# Altium footprint library ubloxLib.PcbLib: 65 footprints (part 3 of 5)
Each footprint in its own frame and in the unit in brackets; x right, y up, seen from the top. Pads: shape width x height; smd on the part's side, far side on the other; paste and mask are expansions set on the pad; w line width, h text height; cw(c..) or ccw(c..) is an arc to the next point about the centre after c.
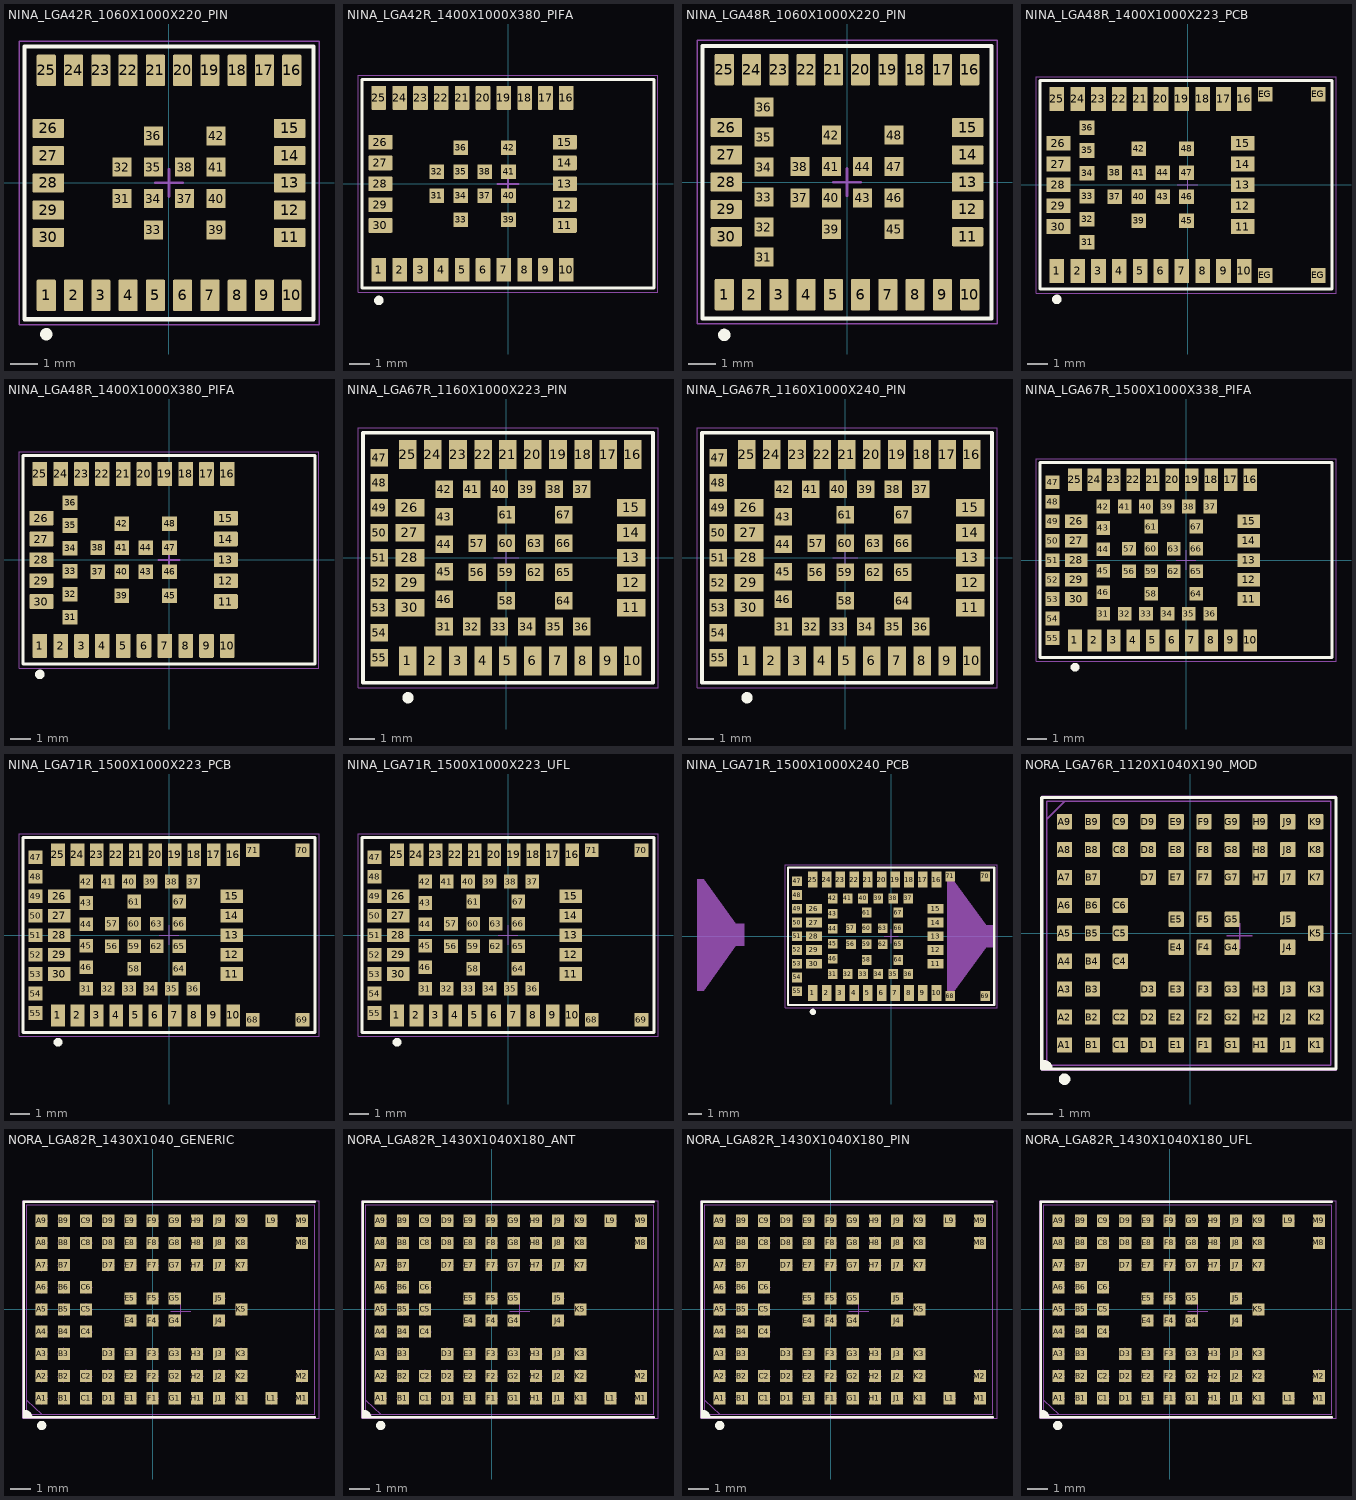
[diagram p2: the footprints below, top view; thin cyan lines are the x and y axes]

## NINA_LGA42R_1060X1000X220_PIN [mm] "Stand-alone Bluetooth low energy module"
height 2.2
pads (42):
  rrect10% 0.7x1.15 smd paste+0 mask+0.05: 1(-4.5,-4.125) 2(-3.5,-4.125) 3(-2.5,-4.125) 4(-1.5,-4.125) 5(-0.5,-4.125) 6(0.5,-4.125) 7(1.5,-4.125) 8(2.5,-4.125) 9(3.5,-4.125) 10(4.5,-4.125) 16(4.5,4.125) 17(3.5,4.125) 18(2.5,4.125) 19(1.5,4.125) 20(0.5,4.125) 21(-0.5,4.125) 22(-1.5,4.125) 23(-2.5,4.125) 24(-3.5,4.125) 25(-4.5,4.125)
  rrect10% 1.15x0.7 smd paste+0 mask+0.05: 11(4.425,-2) 12(4.425,-1) 13(4.425,0) 14(4.425,1) 15(4.425,2) 26(-4.425,2) 27(-4.425,1) 28(-4.425,0) 29(-4.425,-1) 30(-4.425,-2)
  rect 0.7x0.7 smd paste+0 mask+0.05: 31(-1.725,-0.575) 32(-1.725,0.575) 33(-0.575,-1.725) 34(-0.575,-0.575) 35(-0.575,0.575) 36(-0.575,1.725) 37(0.575,-0.575) 38(0.575,0.575) 39(1.725,-1.725) 40(1.725,-0.575) 41(1.725,0.575) 42(1.725,1.725)
Top Overlay:
  circle w0.254: c-4.5,-5.55 r0.1
  lines w0.15: -5.3,-5 5.3,-5 5.3,5 -5.3,5 -5.3,-5
Mechanical 13:
  lines w0.1: -5.3,-5 5.302,-5 5.302,5 -5.3,5 -5.3,-5
Mechanical 15:
  lines w0.05: -5.5,-5.2 -5.5,5.2 5.5,5.2 5.5,-5.2 -5.5,-5.2
  lines w0.1: -0.5,0 0,0 0.5,0 ; 0,-0.5 0,0.5
  text ".Designator" at 0.1,0.433 h1
3D body "NINA-B111.STEP": height 2.26, standoff 0.03, extent -5.3,-5 5.3,5

## NINA_LGA42R_1400X1000X380_PIFA [mm] "Stand-alone Bluetooth low energy module"
height 3.8
pads (42):
  rrect10% 0.7x1.15 smd paste+0 mask+0.05: 1(-6.2,-4.125) 2(-5.2,-4.125) 3(-4.2,-4.125) 4(-3.2,-4.125) 5(-2.2,-4.125) 6(-1.2,-4.125) 7(-0.2,-4.125) 8(0.8,-4.125) 9(1.8,-4.125) 10(2.8,-4.125) 16(2.8,4.125) 17(1.8,4.125) 18(0.8,4.125) 19(-0.2,4.125) 20(-1.2,4.125) 21(-2.2,4.125) 22(-3.2,4.125) 23(-4.2,4.125) 24(-5.2,4.125) 25(-6.2,4.125)
  rrect10% 1.15x0.7 smd paste+0 mask+0.05: 11(2.725,-2) 12(2.725,-1) 13(2.725,0) 14(2.725,1) 15(2.725,2) 26(-6.125,2) 27(-6.125,1) 28(-6.125,0) 29(-6.125,-1) 30(-6.125,-2)
  rect 0.7x0.7 smd paste+0 mask+0.05: 31(-3.425,-0.575) 32(-3.425,0.575) 33(-2.275,-1.725) 34(-2.275,-0.575) 35(-2.275,0.575) 36(-2.275,1.725) 37(-1.125,-0.575) 38(-1.125,0.575) 39(0.025,-1.725) 40(0.025,-0.575) 41(0.025,0.575) 42(0.025,1.725)
Top Overlay:
  circle w0.254: c-6.2,-5.6 r0.1
  lines w0.15: -7,-5 7,-5 7,5 -7,5 -7,-5
Mechanical 13:
  lines w0.1: -7,-5 7,-5 7,5 -7,5 -7,-5
Mechanical 15:
  lines w0.05: -7.2,-5.2 7.2,-5.2 7.2,5.2 -7.2,5.2 -7.2,-5.2
  lines w0.1: -0.5,0 0,0 ; 0,-0.5 0,0.5 ; 0,0 0.5,0 0,0
  text ".Designator" at 0.1,0.433 h1
3D body "NINA-B112.stp": height 3.81, standoff 0.03, extent -7,-5 7,5

## NINA_LGA48R_1060X1000X220_PIN [mm] "Stand-alone Bluetooth low energy module"
height 2.2
pads (48):
  rrect10% 0.7x1.15 smd paste+0 mask+0.05: 1(-4.5,-4.125) 2(-3.5,-4.125) 3(-2.5,-4.125) 4(-1.5,-4.125) 5(-0.5,-4.125) 6(0.5,-4.125) 7(1.5,-4.125) 8(2.5,-4.125) 9(3.5,-4.125) 10(4.5,-4.125) 16(4.5,4.125) 17(3.5,4.125) 18(2.5,4.125) 19(1.5,4.125) 20(0.5,4.125) 21(-0.5,4.125) 22(-1.5,4.125) 23(-2.5,4.125) 24(-3.5,4.125) 25(-4.5,4.125)
  rrect10% 1.15x0.7 smd paste+0 mask+0.05: 11(4.425,-2) 12(4.425,-1) 13(4.425,0) 14(4.425,1) 15(4.425,2) 26(-4.425,2) 27(-4.425,1) 28(-4.425,0) 29(-4.425,-1) 30(-4.425,-2)
  rect 0.7x0.7 smd paste+0 mask+0.05: 31(-3.05,-2.75) 32(-3.05,-1.65) 33(-3.05,-0.55) 34(-3.05,0.55) 35(-3.05,1.65) 36(-3.05,2.75) 37(-1.725,-0.575) 38(-1.725,0.575) 39(-0.575,-1.725) 40(-0.575,-0.575) 41(-0.575,0.575) 42(-0.575,1.725) 43(0.575,-0.575) 44(0.575,0.575) 45(1.725,-1.725) 46(1.725,-0.575) 47(1.725,0.575) 48(1.725,1.725)
Top Overlay:
  circle w0.254: c-4.5,-5.6 r0.1
  lines w0.15: -5.3,-5 -5.3,5 5.3,5 5.3,-5 -5.3,-5
Mechanical 13:
  lines w0.1: -5.3,-5 -5.3,5 5.302,5 5.302,-5 -5.3,-5
Mechanical 15:
  lines w0.05: -5.5,-5.2 5.5,-5.2 5.5,5.2 -5.5,5.2 -5.5,-5.2
  lines w0.1: -0.5,0 0,0 0.5,0 ; 0,-0.5 0,0.5
  text ".Designator" at 0.1,0.433 h1
3D body "NINA-W131-00B.STEP": height 2.25, standoff 0.04, extent -5.3,-5 5.3,5

## NINA_LGA48R_1400X1000X223_PCB [mm] "Stand-alone Bluetooth low energy module"
height 2.23
pads (52):
  rect 0.7x1.15 smd paste+0 mask+0.05: 1(-6.275,-4.125) 2(-5.275,-4.125) 3(-4.275,-4.125) 4(-3.275,-4.125) 5(-2.275,-4.125) 6(-1.275,-4.125) 7(-0.275,-4.125) 8(0.725,-4.125) 9(1.725,-4.125) 10(2.725,-4.125) 16(2.725,4.125) 17(1.725,4.125) 18(0.725,4.125) 19(-0.275,4.125) 20(-1.275,4.125) 21(-2.275,4.125) 22(-3.275,4.125) 23(-4.275,4.125) 24(-5.275,4.125) 25(-6.275,4.125)
  rect 1.15x0.7 smd paste+0 mask+0.05: 11(2.65,-2) 12(2.65,-1) 13(2.65,0) 14(2.65,1) 15(2.65,2) 26(-6.2,2) 27(-6.2,1) 28(-6.2,0) 29(-6.2,-1) 30(-6.2,-2)
  rect 0.7x0.7 smd paste+0 mask+0.05: 31(-4.825,-2.75) 32(-4.825,-1.65) 33(-4.825,-0.55) 34(-4.825,0.55) 35(-4.825,1.65) 36(-4.825,2.75) 37(-3.5,-0.575) 38(-3.5,0.575) 39(-2.35,-1.725) 40(-2.35,-0.575) 41(-2.35,0.575) 42(-2.35,1.725) 43(-1.2,-0.575) 44(-1.2,0.575) 45(-0.05,-1.725) 46(-0.05,-0.575) 47(-0.05,0.575) 48(-0.05,1.725) EG(3.725,-4.35) EG(3.725,4.35) EG(6.275,-4.35) EG(6.275,4.35)
Top Overlay:
  circle w0.254: c-6.275,-5.5 r0.1
  lines w0.15: -7.075,-5 -7.075,5 6.925,5 6.925,-5 -7.075,-5
Mechanical 13:
  lines w0.1: -7.075,-5 -7.075,5 6.925,5 6.925,-5 -7.075,-5
Mechanical 15:
  lines w0.05: -0.5,0 0.5,0 ; 0,-0.5 0,0.5 ; -7.275,-5.2 -7.275,5.2 7.125,5.2 7.125,-5.2 -7.275,-5.2
  text ".Designator" at 0.1,0.433 h1
Multi-Layer:
  pour cut-out: 3.825,4 6.925,4 6.925,-4 3.825,-4
3D body "NINA-W1x6.STEP": height 2.25, standoff -0.01, extent -7.075,-5 6.925,5

## NINA_LGA48R_1400X1000X380_PIFA [mm] "Stand-alone Bluetooth low energy module"
height 3.8
pads (48):
  rrect10% 0.7x1.15 smd paste+0 mask+0.05: 1(-6.2,-4.125) 2(-5.2,-4.125) 3(-4.2,-4.125) 4(-3.2,-4.125) 5(-2.2,-4.125) 6(-1.2,-4.125) 7(-0.2,-4.125) 8(0.8,-4.125) 9(1.8,-4.125) 10(2.8,-4.125) 16(2.8,4.125) 17(1.8,4.125) 18(0.8,4.125) 19(-0.2,4.125) 20(-1.2,4.125) 21(-2.2,4.125) 22(-3.2,4.125) 23(-4.2,4.125) 24(-5.2,4.125) 25(-6.2,4.125)
  rrect10% 1.15x0.7 smd paste+0 mask+0.05: 11(2.725,-2) 12(2.725,-1) 13(2.725,0) 14(2.725,1) 15(2.725,2) 26(-6.125,2) 27(-6.125,1) 28(-6.125,0) 29(-6.125,-1) 30(-6.125,-2)
  rect 0.7x0.7 smd paste+0 mask+0.05: 31(-4.75,-2.75) 32(-4.75,-1.65) 33(-4.75,-0.55) 34(-4.75,0.55) 35(-4.75,1.65) 36(-4.75,2.75) 37(-3.425,-0.575) 38(-3.425,0.575) 39(-2.275,-1.725) 40(-2.275,-0.575) 41(-2.275,0.575) 42(-2.275,1.725) 43(-1.125,-0.575) 44(-1.125,0.575) 45(0.025,-1.725) 46(0.025,-0.575) 47(0.025,0.575) 48(0.025,1.725)
Top Overlay:
  circle w0.254: c-6.2,-5.5 r0.1
  lines w0.15: -7,-5 -7,5 7,5 7,-5 -7,-5
Mechanical 13:
  lines w0.1: -7,-5 -7,5 7,5 7,-5 -7,-5
Mechanical 15:
  lines w0.05: -7.2,-5.2 -7.2,5.2 7.2,5.2 7.2,-5.2 -7.2,-5.2
  lines w0.1: -0.5,0 0,0 0.5,0 ; 0,-0.5 0,0.5
  text ".Designator" at 0.1,0.433 h1
3D body "NINA-W132-00B.STEP": height 3.86, standoff 0.04, extent -7,-5 7,5

## NINA_LGA67R_1160X1000X223_PIN [mm] "Stand-alone Bluetooth low energy module"
height 2.23
pads (67):
  rect 0.7x1.15 smd paste+0 mask+0.05: 1(-3.925,-4.125) 2(-2.925,-4.125) 3(-1.925,-4.125) 4(-0.925,-4.125) 5(0.075,-4.125) 6(1.075,-4.125) 7(2.075,-4.125) 8(3.075,-4.125) 9(4.075,-4.125) 10(5.075,-4.125) 16(5.075,4.125) 17(4.075,4.125) 18(3.075,4.125) 19(2.075,4.125) 20(1.075,4.125) 21(0.075,4.125) 22(-0.925,4.125) 23(-1.925,4.125) 24(-2.925,4.125) 25(-3.925,4.125)
  rect 1.15x0.7 smd paste+0 mask+0.05: 11(5,-2) 12(5,-1) 13(5,0) 14(5,1) 15(5,2) 26(-3.85,2) 27(-3.85,1) 28(-3.85,0) 29(-3.85,-1) 30(-3.85,-2)
  rect 0.7x0.7 smd paste+0 mask+0.05: 31(-2.475,-2.75) 32(-1.375,-2.75) 33(-0.275,-2.75) 34(0.825,-2.75) 35(1.925,-2.75) 36(3.025,-2.75) 37(3.025,2.75) 38(1.925,2.75) 39(0.825,2.75) 40(-0.275,2.75) 41(-1.375,2.75) 42(-2.475,2.75) 43(-2.475,1.65) 44(-2.475,0.55) 45(-2.475,-0.55) 46(-2.475,-1.65) 47(-5.075,4) 48(-5.075,3) 49(-5.075,2) 50(-5.075,1) 51(-5.075,0) 52(-5.075,-1) 53(-5.075,-2) 54(-5.075,-3) 55(-5.075,-4) 56(-1.15,-0.575) 57(-1.15,0.575) 58(0,-1.725) 59(0,-0.575) 60(0,0.575) 61(0,1.725) 62(1.15,-0.575) 63(1.15,0.575) 64(2.3,-1.725) 65(2.3,-0.575) 66(2.3,0.575) 67(2.3,1.725)
Top Overlay:
  circle w0.254: c-3.925,-5.6 r0.1
  lines w0.15: -5.725,-5 5.875,-5 5.875,5 -5.725,5 -5.725,-5
Mechanical 13:
  lines w0.1: -5.725,-5 -5.725,5 5.875,5 5.875,-5 -5.725,-5
Mechanical 15:
  lines w0.05: -0.5,0 0.5,0 ; 0,-0.5 0,0.5 ; -5.925,-5.2 -5.925,5.2 6.075,5.2 6.075,-5.2 -5.925,-5.2
  text ".Designator" at 0.1,0.433 h1
3D body "NINA-B311_mechanical_model.stp": height 2.36, standoff 0.03, extent -5.725,-5 5.875,5

## NINA_LGA67R_1160X1000X240_PIN [mm] "Stand-alone Bluetooth low energy module"
height 2.4
pads (67):
  rect 0.7x1.15 smd paste+0 mask+0.05: 1(-3.925,-4.125) 2(-2.925,-4.125) 3(-1.925,-4.125) 4(-0.925,-4.125) 5(0.075,-4.125) 6(1.075,-4.125) 7(2.075,-4.125) 8(3.075,-4.125) 9(4.075,-4.125) 10(5.075,-4.125) 16(5.075,4.125) 17(4.075,4.125) 18(3.075,4.125) 19(2.075,4.125) 20(1.075,4.125) 21(0.075,4.125) 22(-0.925,4.125) 23(-1.925,4.125) 24(-2.925,4.125) 25(-3.925,4.125)
  rect 1.15x0.7 smd paste+0 mask+0.05: 11(5,-2) 12(5,-1) 13(5,0) 14(5,1) 15(5,2) 26(-3.85,2) 27(-3.85,1) 28(-3.85,0) 29(-3.85,-1) 30(-3.85,-2)
  rect 0.7x0.7 smd paste+0 mask+0.05: 31(-2.475,-2.75) 32(-1.375,-2.75) 33(-0.275,-2.75) 34(0.825,-2.75) 35(1.925,-2.75) 36(3.025,-2.75) 37(3.025,2.75) 38(1.925,2.75) 39(0.825,2.75) 40(-0.275,2.75) 41(-1.375,2.75) 42(-2.475,2.75) 43(-2.475,1.65) 44(-2.475,0.55) 45(-2.475,-0.55) 46(-2.475,-1.65) 47(-5.075,4) 48(-5.075,3) 49(-5.075,2) 50(-5.075,1) 51(-5.075,0) 52(-5.075,-1) 53(-5.075,-2) 54(-5.075,-3) 55(-5.075,-4) 56(-1.15,-0.575) 57(-1.15,0.575) 58(0,-1.725) 59(0,-0.575) 60(0,0.575) 61(0,1.725) 62(1.15,-0.575) 63(1.15,0.575) 64(2.3,-1.725) 65(2.3,-0.575) 66(2.3,0.575) 67(2.3,1.725)
Top Overlay:
  circle w0.254: c-3.925,-5.6 r0.1
  lines w0.15: -5.725,-5 5.875,-5 5.875,5 -5.725,5 -5.725,-5
Mechanical 13:
  lines w0.1: -5.725,-5 -5.725,5 5.875,5 5.875,-5 -5.725,-5
Mechanical 15:
  lines w0.05: -0.5,0 0.5,0 ; 0,-0.5 0,0.5 ; -5.925,-5.2 -5.925,5.2 6.075,5.2 6.075,-5.2 -5.925,-5.2
  text ".Designator" at 0.1,0.433 h1
3D body "NINA-B501.step": height 2.53, standoff 0.07, extent -5.725,-5 5.875,5

## NINA_LGA67R_1500X1000X338_PIFA [mm] "Stand-alone Bluetooth low energy module"
height 3.38
pads (67):
  rect 0.7x1.15 smd paste+0 mask+0.05: 1(-5.7,-4.125) 2(-4.7,-4.125) 3(-3.7,-4.125) 4(-2.7,-4.125) 5(-1.7,-4.125) 6(-0.7,-4.125) 7(0.3,-4.125) 8(1.3,-4.125) 9(2.3,-4.125) 10(3.3,-4.125) 16(3.3,4.125) 17(2.3,4.125) 18(1.3,4.125) 19(0.3,4.125) 20(-0.7,4.125) 21(-1.7,4.125) 22(-2.7,4.125) 23(-3.7,4.125) 24(-4.7,4.125) 25(-5.7,4.125)
  rect 1.15x0.7 smd paste+0 mask+0.05: 11(3.225,-2) 12(3.225,-1) 13(3.225,0) 14(3.225,1) 15(3.225,2) 26(-5.625,2) 27(-5.625,1) 28(-5.625,0) 29(-5.625,-1) 30(-5.625,-2)
  rect 0.7x0.7 smd paste+0 mask+0.05: 31(-4.25,-2.75) 32(-3.15,-2.75) 33(-2.05,-2.75) 34(-0.95,-2.75) 35(0.15,-2.75) 36(1.25,-2.75) 37(1.25,2.75) 38(0.15,2.75) 39(-0.95,2.75) 40(-2.05,2.75) 41(-3.15,2.75) 42(-4.25,2.75) 43(-4.25,1.65) 44(-4.25,0.55) 45(-4.25,-0.55) 46(-4.25,-1.65) 47(-6.85,4) 48(-6.85,3) 49(-6.85,2) 50(-6.85,1) 51(-6.85,0) 52(-6.85,-1) 53(-6.85,-2) 54(-6.85,-3) 55(-6.85,-4) 56(-2.925,-0.575) 57(-2.925,0.575) 58(-1.775,-1.725) 59(-1.775,-0.575) 60(-1.775,0.575) 61(-1.775,1.725) 62(-0.625,-0.575) 63(-0.625,0.575) 64(0.525,-1.725) 65(0.525,-0.575) 66(0.525,0.575) 67(0.525,1.725)
Top Overlay:
  circle w0.254: c-5.7,-5.5 r0.1
  lines w0.15: -7.5,-5 7.5,-5 7.5,5 -7.5,5 -7.5,-5
Mechanical 13:
  lines w0.1: -7.5,-5 7.5,-5 7.5,5 -7.5,5 -7.5,-5
Mechanical 15:
  lines w0.05: -0.5,0 0.5,0 ; 0,-0.5 0,0.5 ; -7.7,-5.2 7.7,-5.2 7.7,5.2 -7.7,5.2 -7.7,-5.2
  text ".Designator" at 0.1,0.433 h1
3D body "NINA-B312_mechanical_model.stp": height 3.91, standoff 0.03, extent -7.5,-5 7.5,5

## NINA_LGA71R_1500X1000X223_PCB [mm] "Stand-alone Bluetooth low energy module"
height 3.38
pads (71):
  rect 0.7x1.15 smd paste+0 mask+0.05: 1(-5.7,-4.125) 2(-4.7,-4.125) 3(-3.7,-4.125) 4(-2.7,-4.125) 5(-1.7,-4.125) 6(-0.7,-4.125) 7(0.3,-4.125) 8(1.3,-4.125) 9(2.3,-4.125) 10(3.3,-4.125) 16(3.3,4.125) 17(2.3,4.125) 18(1.3,4.125) 19(0.3,4.125) 20(-0.7,4.125) 21(-1.7,4.125) 22(-2.7,4.125) 23(-3.7,4.125) 24(-4.7,4.125) 25(-5.7,4.125)
  rect 1.15x0.7 smd paste+0 mask+0.05: 11(3.225,-2) 12(3.225,-1) 13(3.225,0) 14(3.225,1) 15(3.225,2) 26(-5.625,2) 27(-5.625,1) 28(-5.625,0) 29(-5.625,-1) 30(-5.625,-2)
  rect 0.7x0.7 smd paste+0 mask+0.05: 31(-4.25,-2.75) 32(-3.15,-2.75) 33(-2.05,-2.75) 34(-0.95,-2.75) 35(0.15,-2.75) 36(1.25,-2.75) 37(1.25,2.75) 38(0.15,2.75) 39(-0.95,2.75) 40(-2.05,2.75) 41(-3.15,2.75) 42(-4.25,2.75) 43(-4.25,1.65) 44(-4.25,0.55) 45(-4.25,-0.55) 46(-4.25,-1.65) 47(-6.85,4) 48(-6.85,3) 49(-6.85,2) 50(-6.85,1) 51(-6.85,0) 52(-6.85,-1) 53(-6.85,-2) 54(-6.85,-3) 55(-6.85,-4) 56(-2.925,-0.575) 57(-2.925,0.575) 58(-1.775,-1.725) 59(-1.775,-0.575) 60(-1.775,0.575) 61(-1.775,1.725) 62(-0.625,-0.575) 63(-0.625,0.575) 64(0.525,-1.725) 65(0.525,-0.575) 66(0.525,0.575) 67(0.525,1.725) 68(4.3,-4.35) 69(6.85,-4.35) 70(6.85,4.35) 71(4.3,4.35)
Top Overlay:
  circle w0.254: c-5.7,-5.5 r0.1
  lines w0.15: -7.5,-5 7.5,-5 7.5,5 -7.5,5 -7.5,-5
Mechanical 13:
  lines w0.1: -7.5,-5 7.5,-5 7.5,5 -7.5,5 -7.5,-5
Mechanical 15:
  lines w0.05: -0.5,0 0.5,0 ; 0,-0.5 0,0.5 ; -7.7,-5.2 7.7,-5.2 7.7,5.2 -7.7,5.2 -7.7,-5.2
  text ".Designator" at 0.1,0.433 h1
Multi-Layer:
  pour cut-out: 4.4,4 7.5,4 7.5,-4 4.4,-4
3D body "NINA-B3x6_mechanical_model.stp": height 2.31, standoff 0.03, extent -7.5,-5 7.5,5

## NINA_LGA71R_1500X1000X223_UFL [mm] "Stand-alone Bluetooth low energy module"
height 2.23
pads (71):
  rect 0.7x1.15 smd paste+0 mask+0.05: 1(-5.7,-4.125) 2(-4.7,-4.125) 3(-3.7,-4.125) 4(-2.7,-4.125) 5(-1.7,-4.125) 6(-0.7,-4.125) 7(0.3,-4.125) 8(1.3,-4.125) 9(2.3,-4.125) 10(3.3,-4.125) 16(3.3,4.125) 17(2.3,4.125) 18(1.3,4.125) 19(0.3,4.125) 20(-0.7,4.125) 21(-1.7,4.125) 22(-2.7,4.125) 23(-3.7,4.125) 24(-4.7,4.125) 25(-5.7,4.125)
  rect 1.15x0.7 smd paste+0 mask+0.05: 11(3.225,-2) 12(3.225,-1) 13(3.225,0) 14(3.225,1) 15(3.225,2) 26(-5.625,2) 27(-5.625,1) 28(-5.625,0) 29(-5.625,-1) 30(-5.625,-2)
  rect 0.7x0.7 smd paste+0 mask+0.05: 31(-4.25,-2.75) 32(-3.15,-2.75) 33(-2.05,-2.75) 34(-0.95,-2.75) 35(0.15,-2.75) 36(1.25,-2.75) 37(1.25,2.75) 38(0.15,2.75) 39(-0.95,2.75) 40(-2.05,2.75) 41(-3.15,2.75) 42(-4.25,2.75) 43(-4.25,1.65) 44(-4.25,0.55) 45(-4.25,-0.55) 46(-4.25,-1.65) 47(-6.85,4) 48(-6.85,3) 49(-6.85,2) 50(-6.85,1) 51(-6.85,0) 52(-6.85,-1) 53(-6.85,-2) 54(-6.85,-3) 55(-6.85,-4) 56(-2.925,-0.575) 57(-2.925,0.575) 58(-1.775,-1.725) 59(-1.775,-0.575) 60(-1.775,0.575) 61(-1.775,1.725) 62(-0.625,-0.575) 63(-0.625,0.575) 64(0.525,-1.725) 65(0.525,-0.575) 66(0.525,0.575) 67(0.525,1.725) 68(4.3,-4.35) 69(6.85,-4.35) 70(6.85,4.35) 71(4.3,4.35)
Top Overlay:
  circle w0.254: c-5.7,-5.5 r0.1
  lines w0.15: -7.5,-5 7.5,-5 7.5,5 -7.5,5 -7.5,-5
Mechanical 13:
  lines w0.1: -7.5,-5 7.5,-5 7.5,5 -7.5,5 -7.5,-5
Mechanical 15:
  lines w0.05: -0.5,0 0.5,0 ; 0,-0.5 0,0.5 ; -7.7,-5.2 7.7,-5.2 7.7,5.2 -7.7,5.2 -7.7,-5.2
  text ".Designator" at 0.1,0.433 h1
3D body "NINA-B400.stp": height 2.31, standoff 0.03, extent -7.5,-5 7.5,5

## NINA_LGA71R_1500X1000X240_PCB [mm] "Stand-alone Bluetooth low energy module"
height 2.4
pads (71):
  rect 0.7x1.15 smd paste+0 mask+0.05: 1(-5.7,-4.125) 2(-4.7,-4.125) 3(-3.7,-4.125) 4(-2.7,-4.125) 5(-1.7,-4.125) 6(-0.7,-4.125) 7(0.3,-4.125) 8(1.3,-4.125) 9(2.3,-4.125) 10(3.3,-4.125) 16(3.3,4.125) 17(2.3,4.125) 18(1.3,4.125) 19(0.3,4.125) 20(-0.7,4.125) 21(-1.7,4.125) 22(-2.7,4.125) 23(-3.7,4.125) 24(-4.7,4.125) 25(-5.7,4.125)
  rect 1.15x0.7 smd paste+0 mask+0.05: 11(3.225,-2) 12(3.225,-1) 13(3.225,0) 14(3.225,1) 15(3.225,2) 26(-5.625,2) 27(-5.625,1) 28(-5.625,0) 29(-5.625,-1) 30(-5.625,-2)
  rect 0.7x0.7 smd paste+0 mask+0.05: 31(-4.25,-2.75) 32(-3.15,-2.75) 33(-2.05,-2.75) 34(-0.95,-2.75) 35(0.15,-2.75) 36(1.25,-2.75) 37(1.25,2.75) 38(0.15,2.75) 39(-0.95,2.75) 40(-2.05,2.75) 41(-3.15,2.75) 42(-4.25,2.75) 43(-4.25,1.65) 44(-4.25,0.55) 45(-4.25,-0.55) 46(-4.25,-1.65) 47(-6.85,4) 48(-6.85,3) 49(-6.85,2) 50(-6.85,1) 51(-6.85,0) 52(-6.85,-1) 53(-6.85,-2) 54(-6.85,-3) 55(-6.85,-4) 56(-2.925,-0.575) 57(-2.925,0.575) 58(-1.775,-1.725) 59(-1.775,-0.575) 60(-1.775,0.575) 61(-1.775,1.725) 62(-0.625,-0.575) 63(-0.625,0.575) 64(0.525,-1.725) 65(0.525,-0.575) 66(0.525,0.575) 67(0.525,1.725) 68(4.3,-4.35) 69(6.85,-4.35) 70(6.85,4.35) 71(4.3,4.35)
Top Overlay:
  circle w0.254: c-5.7,-5.5 r0.1
  lines w0.15: -7.5,-5 -7.5,5 7.5,5 7.5,-5 -7.5,-5
Mechanical 13:
  cavity: 7.5,0.8 6.9,0.8 4.55,4.05 4.07,4.05 4.07,-4.05 4.55,-4.05 6.9,-0.8 7.5,-0.8
  lines w0.1: -7.5,-5 -7.5,5 7.5,5 7.5,-5 -7.5,-5
Mechanical 14:
  cavity: -10.7,0.9 -11.3,0.9 -13.65,4.15 -14.13,4.15 -14.13,-3.95 -13.65,-3.95 -11.3,-0.7 -10.7,-0.7
Mechanical 15:
  lines w0.05: -0.5,0 0.5,0 ; 0,-0.5 0,0.5 ; -7.7,-5.2 -7.7,5.2 7.7,5.2 7.7,-5.2 -7.7,-5.2
  text ".Designator" at 0.1,0.433 h1
3D body "NINA-B506.step": height 2.46, standoff 0, extent -7.5,-5 7.5,5

## NORA_LGA76R_1120X1040X190_MOD [mm] "NORA LGA.76pin ,1.1mm Pitch, 11.2mm x 10.4mm, to be used for modules"
height 1.9
pads (76):
  rrect10% 0.6x0.6 smd: A1(-4.95,-4.4) A2(-4.95,-3.3) A3(-4.95,-2.2) A4(-4.95,-1.1) A5(-4.95,0) A6(-4.95,1.1) A7(-4.95,2.2) A8(-4.95,3.3) A9(-4.95,4.4) B1(-3.85,-4.4) B2(-3.85,-3.3) B3(-3.85,-2.2) B4(-3.85,-1.1) B5(-3.85,0) B6(-3.85,1.1) B7(-3.85,2.2) B8(-3.85,3.3) B9(-3.85,4.4) C1(-2.75,-4.4) C2(-2.75,-3.3) C4(-2.75,-1.1) C5(-2.75,0) C6(-2.75,1.1) C8(-2.75,3.3) C9(-2.75,4.4) D1(-1.65,-4.4) D2(-1.65,-3.3) D3(-1.65,-2.2) D7(-1.65,2.2) D8(-1.65,3.3) D9(-1.65,4.4) E1(-0.55,-4.4) E2(-0.55,-3.3) E3(-0.55,-2.2) E4(-0.55,-0.55) E5(-0.55,0.55) E7(-0.55,2.2) E8(-0.55,3.3) E9(-0.55,4.4) F1(0.55,-4.4) F2(0.55,-3.3) F3(0.55,-2.2) F4(0.55,-0.55) F5(0.55,0.55) F7(0.55,2.2) F8(0.55,3.3) F9(0.55,4.4) G1(1.65,-4.4) G2(1.65,-3.3) G3(1.65,-2.2) G4(1.65,-0.55) G5(1.65,0.55) G7(1.65,2.2) G8(1.65,3.3) G9(1.65,4.4) H1(2.75,-4.4) H2(2.75,-3.3) H3(2.75,-2.2) H7(2.75,2.2) H8(2.75,3.3) H9(2.75,4.4) J1(3.85,-4.4) J2(3.85,-3.3) J3(3.85,-2.2) J4(3.85,-0.55) J5(3.85,0.55) J7(3.85,2.2) J8(3.85,3.3) J9(3.85,4.4) K1(4.95,-4.4) K2(4.95,-3.3) K3(4.95,-2.2) K5(4.95,0) K7(4.95,2.2) K8(4.95,3.3) K9(4.95,4.4)
Top Overlay:
  circle w0.254: c-4.95,-5.75 r0.1
  lines w0.127: -5.85,-5.35 5.75,-5.35 5.75,5.35 -5.85,5.35 -5.85,-5.35
  lines w0.128: -5.793,-5.194 -5.643,-5.344 ; -5.75,-5.15 cw(c-5.75,-5.3) -5.6,-5.3 ; -5.75,-5.05 cw(c-5.775,-5.349) -5.475,-5.349
Mechanical 11:
  text ".Designator" at -0.525,-0.775 h0.5
Mechanical 13:
  lines w0.05: -5.65,4.5 -4.95,5.2 ; -5.65,-5.2 5.55,-5.2 5.55,5.2 -5.65,5.2 -5.65,-5.2
Mechanical 15:
  lines w0.05: 1.45,-0.1 2.45,-0.1 ; 1.95,-0.6 1.95,0.4 ; -5.85,-5.4 5.75,-5.4 5.75,5.4 -5.85,5.4 -5.85,-5.4
3D body "NORA-B201_1120um.step": height 1.95, standoff 0.01, extent -5.65,-5.2 5.55,5.2

## NORA_LGA82R_1430X1040_GENERIC [mm] "NORA LGA, 82pin ,1.1mm Pitch, 14.3mm x 10.4mm"
height 1.8
pads (82):
  rect 0.6x0.6 smd: A1(-5.5,-4.4) A2(-5.5,-3.3) A3(-5.5,-2.2) A4(-5.5,-1.1) A5(-5.5,0) A6(-5.5,1.1) A7(-5.5,2.2) A8(-5.5,3.3) A9(-5.5,4.4) B1(-4.4,-4.4) B2(-4.4,-3.3) B3(-4.4,-2.2) B4(-4.4,-1.1) B5(-4.4,0) B6(-4.4,1.1) B7(-4.4,2.2) B8(-4.4,3.3) B9(-4.4,4.4) C1(-3.3,-4.4) C2(-3.3,-3.3) C4(-3.3,-1.1) C5(-3.3,0) C6(-3.3,1.1) C8(-3.3,3.3) C9(-3.3,4.4) D1(-2.2,-4.4) D2(-2.2,-3.3) D3(-2.2,-2.2) D7(-2.2,2.2) D8(-2.2,3.3) D9(-2.2,4.4) E1(-1.1,-4.4) E2(-1.1,-3.3) E3(-1.1,-2.2) E4(-1.1,-0.55) E5(-1.1,0.55) E7(-1.1,2.2) E8(-1.1,3.3) E9(-1.1,4.4) F1(0,-4.4) F2(0,-3.3) F3(0,-2.2) F4(0,-0.55) F5(0,0.55) F7(0,2.2) F8(0,3.3) F9(0,4.4) G1(1.1,-4.4) G2(1.1,-3.3) G3(1.1,-2.2) G4(1.1,-0.55) G5(1.1,0.55) G7(1.1,2.2) G8(1.1,3.3) G9(1.1,4.4) H1(2.2,-4.4) H2(2.2,-3.3) H3(2.2,-2.2) H7(2.2,2.2) H8(2.2,3.3) H9(2.2,4.4) J1(3.3,-4.4) J2(3.3,-3.3) J3(3.3,-2.2) J4(3.3,-0.55) J5(3.3,0.55) J7(3.3,2.2) J8(3.3,3.3) J9(3.3,4.4) K1(4.4,-4.4) K2(4.4,-3.3) K3(4.4,-2.2) K5(4.4,0) K7(4.4,2.2) K8(4.4,3.3) K9(4.4,4.4) L1(5.9,-4.4) L9(5.9,4.4) M1(7.4,-4.4) M2(7.4,-3.3) M8(7.4,3.3) M9(7.4,4.4)
Top Overlay:
  circle w0.254: c-5.5,-5.75 r0.1
  lines w0.127: 8.05,-5.35 -6.4,-5.35 -6.4,5.35 8.05,5.35
  lines w0.128: -6.343,-5.194 -6.193,-5.344 ; -6.3,-5.15 cw(c-6.3,-5.3) -6.15,-5.3 ; -6.3,-5.05 cw(c-6.325,-5.349) -6.025,-5.349
Mechanical 11:
  text ".Designator" at -1.075,-0.775 h1.5
Mechanical 13:
  lines w0.05: -6.25,-4.5 -5.5,-5.2 ; -6.25,-5.2 8.05,-5.2 8.05,5.2 -6.25,5.2 -6.25,-5.2
Mechanical 14:
  drawing of 328 lines, arcs and shapes, not listed
Mechanical 15:
  lines w0.05: 0.9,-0.1 1.9,-0.1 ; 1.4,-0.6 1.4,0.4 ; -6.45,-5.4 -6.45,5.4 8.25,5.4 8.25,-5.4 -6.45,-5.4
Mechanical 16:
  drawing of 492 lines, arcs and shapes, not listed
Multi-Layer:
  pour cut-out: 7.1,-4.1 7.1,-3.001 7.9,-2.998 7.9,-5.225 8.25,-5.225 8.25,5.325 7.9,5.325 7.9,3 7.1,3 7.1,4.1 4.7,4.1 4.7,-4.1

## NORA_LGA82R_1430X1040X180_ANT [mm] "NORA LGA, 82pin ,1.1mm Pitch, 14.3mm x 10.4mm"
height 1.8
pads (82):
  rect 0.6x0.6 smd: A1(-5.5,-4.4) A2(-5.5,-3.3) A3(-5.5,-2.2) A4(-5.5,-1.1) A5(-5.5,0) A6(-5.5,1.1) A7(-5.5,2.2) A8(-5.5,3.3) A9(-5.5,4.4) B1(-4.4,-4.4) B2(-4.4,-3.3) B3(-4.4,-2.2) B4(-4.4,-1.1) B5(-4.4,0) B6(-4.4,1.1) B7(-4.4,2.2) B8(-4.4,3.3) B9(-4.4,4.4) C1(-3.3,-4.4) C2(-3.3,-3.3) C4(-3.3,-1.1) C5(-3.3,0) C6(-3.3,1.1) C8(-3.3,3.3) C9(-3.3,4.4) D1(-2.2,-4.4) D2(-2.2,-3.3) D3(-2.2,-2.2) D7(-2.2,2.2) D8(-2.2,3.3) D9(-2.2,4.4) E1(-1.1,-4.4) E2(-1.1,-3.3) E3(-1.1,-2.2) E4(-1.1,-0.55) E5(-1.1,0.55) E7(-1.1,2.2) E8(-1.1,3.3) E9(-1.1,4.4) F1(0,-4.4) F2(0,-3.3) F3(0,-2.2) F4(0,-0.55) F5(0,0.55) F7(0,2.2) F8(0,3.3) F9(0,4.4) G1(1.1,-4.4) G2(1.1,-3.3) G3(1.1,-2.2) G4(1.1,-0.55) G5(1.1,0.55) G7(1.1,2.2) G8(1.1,3.3) G9(1.1,4.4) H1(2.2,-4.4) H2(2.2,-3.3) H3(2.2,-2.2) H7(2.2,2.2) H8(2.2,3.3) H9(2.2,4.4) J1(3.3,-4.4) J2(3.3,-3.3) J3(3.3,-2.2) J4(3.3,-0.55) J5(3.3,0.55) J7(3.3,2.2) J8(3.3,3.3) J9(3.3,4.4) K1(4.4,-4.4) K2(4.4,-3.3) K3(4.4,-2.2) K5(4.4,0) K7(4.4,2.2) K8(4.4,3.3) K9(4.4,4.4) L1(5.9,-4.4) L9(5.9,4.4) M1(7.4,-4.4) M2(7.4,-3.3) M8(7.4,3.3) M9(7.4,4.4)
Top Overlay:
  circle w0.254: c-5.5,-5.75 r0.1
  lines w0.127: 8.05,-5.35 -6.4,-5.35 -6.4,5.35 8.05,5.35
  lines w0.128: -6.343,-5.194 -6.193,-5.344 ; -6.3,-5.15 cw(c-6.3,-5.3) -6.15,-5.3 ; -6.3,-5.05 cw(c-6.325,-5.349) -6.025,-5.349
Mechanical 11:
  text ".Designator" at -1.075,-0.775 h1.5
Mechanical 13:
  lines w0.05: -6.25,-4.5 -5.5,-5.2 ; -6.25,-5.2 -6.25,5.2 8.05,5.2 8.05,-5.2 -6.25,-5.2
Mechanical 14:
  drawing of 328 lines, arcs and shapes, not listed
Mechanical 15:
  lines w0.05: 0.9,-0.1 1.9,-0.1 ; 1.4,-0.6 1.4,0.4 ; -6.45,-5.4 8.25,-5.4 8.25,5.4 -6.45,5.4 -6.45,-5.4
Mechanical 16:
  drawing of 492 lines, arcs and shapes, not listed
Multi-Layer:
  pour cut-out: 7.1,-4.1 7.1,-3.001 7.9,-2.998 7.9,-5.225 8.25,-5.225 8.25,5.325 7.9,5.325 7.9,3 7.1,3 7.1,4.1 4.7,4.1 4.7,-4.1
3D body "NORA-B506_v1.step": height 1.78, standoff -0.01, extent -6.25,-5.2 8.05,5.2

## NORA_LGA82R_1430X1040X180_PIN [mm] "NORA LGA, 82pin ,1.1mm Pitch, 14.3mm x 10.4mm"
height 1.8
pads (82):
  rect 0.6x0.6 smd: A1(-5.5,-4.4) A2(-5.5,-3.3) A3(-5.5,-2.2) A4(-5.5,-1.1) A5(-5.5,0) A6(-5.5,1.1) A7(-5.5,2.2) A8(-5.5,3.3) A9(-5.5,4.4) B1(-4.4,-4.4) B2(-4.4,-3.3) B3(-4.4,-2.2) B4(-4.4,-1.1) B5(-4.4,0) B6(-4.4,1.1) B7(-4.4,2.2) B8(-4.4,3.3) B9(-4.4,4.4) C1(-3.3,-4.4) C2(-3.3,-3.3) C4(-3.3,-1.1) C5(-3.3,0) C6(-3.3,1.1) C8(-3.3,3.3) C9(-3.3,4.4) D1(-2.2,-4.4) D2(-2.2,-3.3) D3(-2.2,-2.2) D7(-2.2,2.2) D8(-2.2,3.3) D9(-2.2,4.4) E1(-1.1,-4.4) E2(-1.1,-3.3) E3(-1.1,-2.2) E4(-1.1,-0.55) E5(-1.1,0.55) E7(-1.1,2.2) E8(-1.1,3.3) E9(-1.1,4.4) F1(0,-4.4) F2(0,-3.3) F3(0,-2.2) F4(0,-0.55) F5(0,0.55) F7(0,2.2) F8(0,3.3) F9(0,4.4) G1(1.1,-4.4) G2(1.1,-3.3) G3(1.1,-2.2) G4(1.1,-0.55) G5(1.1,0.55) G7(1.1,2.2) G8(1.1,3.3) G9(1.1,4.4) H1(2.2,-4.4) H2(2.2,-3.3) H3(2.2,-2.2) H7(2.2,2.2) H8(2.2,3.3) H9(2.2,4.4) J1(3.3,-4.4) J2(3.3,-3.3) J3(3.3,-2.2) J4(3.3,-0.55) J5(3.3,0.55) J7(3.3,2.2) J8(3.3,3.3) J9(3.3,4.4) K1(4.4,-4.4) K2(4.4,-3.3) K3(4.4,-2.2) K5(4.4,0) K7(4.4,2.2) K8(4.4,3.3) K9(4.4,4.4) L1(5.9,-4.4) L9(5.9,4.4) M1(7.4,-4.4) M2(7.4,-3.3) M8(7.4,3.3) M9(7.4,4.4)
Top Overlay:
  circle w0.254: c-5.5,-5.75 r0.1
  lines w0.127: 8.05,-5.35 -6.4,-5.35 -6.4,5.35 8.05,5.35
  lines w0.128: -6.343,-5.194 -6.193,-5.344 ; -6.3,-5.15 cw(c-6.3,-5.3) -6.15,-5.3 ; -6.3,-5.05 cw(c-6.325,-5.349) -6.025,-5.349
Mechanical 11:
  text ".Designator" at -1.075,-0.775 h1.5
Mechanical 13:
  lines w0.05: -6.25,-4.5 -5.5,-5.2 ; -6.25,-5.2 8.05,-5.2 8.05,5.2 -6.25,5.2 -6.25,-5.2
Mechanical 14:
  drawing of 328 lines, arcs and shapes, not listed
Mechanical 15:
  lines w0.05: 0.9,-0.1 1.9,-0.1 ; 1.4,-0.6 1.4,0.4 ; -6.45,-5.4 -6.45,5.4 8.25,5.4 8.25,-5.4 -6.45,-5.4
Mechanical 16:
  drawing of 492 lines, arcs and shapes, not listed
Multi-Layer:
  pour cut-out: 7.1,-4.1 7.1,-3.001 7.9,-2.998 7.9,-5.225 8.25,-5.225 8.25,5.325 7.9,5.325 7.9,3 7.1,3 7.1,4.1 4.7,4.1 4.7,-4.1
3D body "NORA-B101_revA.step": height 1.78, standoff -0.01, extent -6.25,-5.2 8.05,5.2

## NORA_LGA82R_1430X1040X180_UFL [mm] "NORA LGA, 82pin ,1.1mm Pitch, 14.3mm x 10.4mm"
height 1.8
pads (82):
  rect 0.6x0.6 smd: A1(-5.5,-4.4) A2(-5.5,-3.3) A3(-5.5,-2.2) A4(-5.5,-1.1) A5(-5.5,0) A6(-5.5,1.1) A7(-5.5,2.2) A8(-5.5,3.3) A9(-5.5,4.4) B1(-4.4,-4.4) B2(-4.4,-3.3) B3(-4.4,-2.2) B4(-4.4,-1.1) B5(-4.4,0) B6(-4.4,1.1) B7(-4.4,2.2) B8(-4.4,3.3) B9(-4.4,4.4) C1(-3.3,-4.4) C2(-3.3,-3.3) C4(-3.3,-1.1) C5(-3.3,0) C6(-3.3,1.1) C8(-3.3,3.3) C9(-3.3,4.4) D1(-2.2,-4.4) D2(-2.2,-3.3) D3(-2.2,-2.2) D7(-2.2,2.2) D8(-2.2,3.3) D9(-2.2,4.4) E1(-1.1,-4.4) E2(-1.1,-3.3) E3(-1.1,-2.2) E4(-1.1,-0.55) E5(-1.1,0.55) E7(-1.1,2.2) E8(-1.1,3.3) E9(-1.1,4.4) F1(0,-4.4) F2(0,-3.3) F3(0,-2.2) F4(0,-0.55) F5(0,0.55) F7(0,2.2) F8(0,3.3) F9(0,4.4) G1(1.1,-4.4) G2(1.1,-3.3) G3(1.1,-2.2) G4(1.1,-0.55) G5(1.1,0.55) G7(1.1,2.2) G8(1.1,3.3) G9(1.1,4.4) H1(2.2,-4.4) H2(2.2,-3.3) H3(2.2,-2.2) H7(2.2,2.2) H8(2.2,3.3) H9(2.2,4.4) J1(3.3,-4.4) J2(3.3,-3.3) J3(3.3,-2.2) J4(3.3,-0.55) J5(3.3,0.55) J7(3.3,2.2) J8(3.3,3.3) J9(3.3,4.4) K1(4.4,-4.4) K2(4.4,-3.3) K3(4.4,-2.2) K5(4.4,0) K7(4.4,2.2) K8(4.4,3.3) K9(4.4,4.4) L1(5.9,-4.4) L9(5.9,4.4) M1(7.4,-4.4) M2(7.4,-3.3) M8(7.4,3.3) M9(7.4,4.4)
Top Overlay:
  circle w0.254: c-5.55,-5.75 r0.1
  lines w0.127: 8.05,-5.35 -6.4,-5.35 -6.4,5.35 8.05,5.35
  lines w0.128: -6.343,-5.194 -6.193,-5.344 ; -6.3,-5.15 cw(c-6.3,-5.3) -6.15,-5.3 ; -6.3,-5.05 cw(c-6.325,-5.349) -6.025,-5.349
Mechanical 11:
  text ".Designator" at -1.075,-0.775 h1.5
Mechanical 13:
  lines w0.05: -6.25,-4.5 -5.5,-5.2 ; -6.25,-5.2 8.05,-5.2 8.05,5.2 -6.25,5.2 -6.25,-5.2
Mechanical 14:
  drawing of 328 lines, arcs and shapes, not listed
Mechanical 15:
  lines w0.05: 0.9,-0.1 1.9,-0.1 ; 1.4,-0.6 1.4,0.4 ; -6.45,-5.4 -6.45,5.4 8.25,5.4 8.25,-5.4 -6.45,-5.4
Mechanical 16:
  drawing of 492 lines, arcs and shapes, not listed
Multi-Layer:
  pour cut-out: 7.1,-4.1 7.1,-3.001 7.9,-2.998 7.9,-5.225 8.25,-5.225 8.25,5.325 7.9,5.325 7.9,3 7.1,3 7.1,4.1 4.7,4.1 4.7,-4.1
3D body "NORA-B100_revA.step": height 1.78, standoff -0.01, extent -6.25,-5.2 8.05,5.2